# Altium schematic symbol library Capacitors.SchLib: 267 symbols (part 4 of 4)
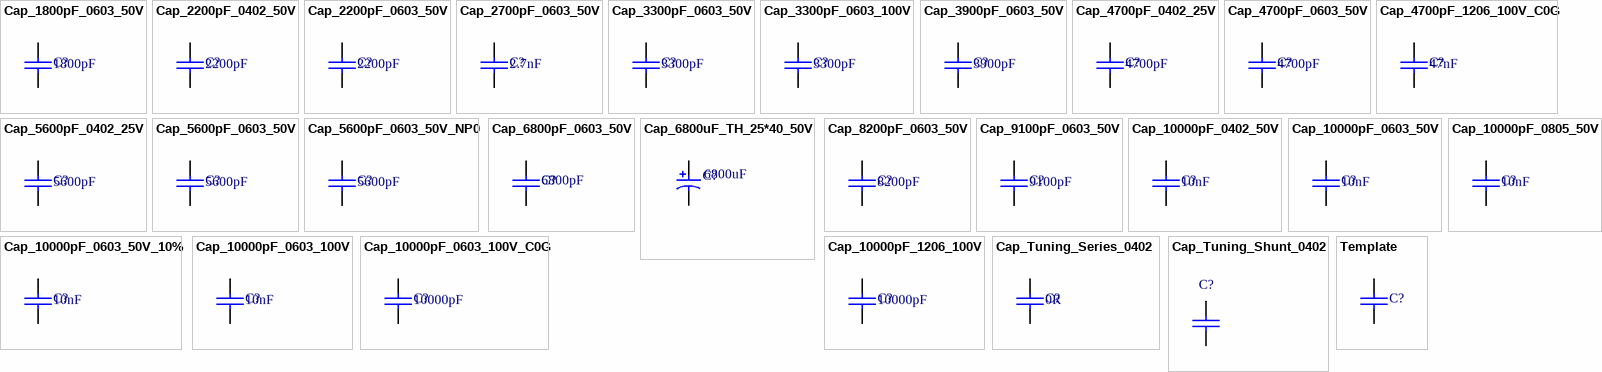
[diagram p9: symbols Cap_1800pF_0603_50V to Template]

## Cap_10000pF_1206_100V
designator C?, comment value 10000pF  (hidden comment: 10000pF 100V)
CAP CER 10000PF 100V X7R 1206; Manufacturer: Würth Elektronik; Manufacturer Part Number: 885012208112; Supplier 1: Digi-Key; Supplier Part Number 1: 732-12140-1-ND; Last modified by: J.Jaramillo; Last modified date: 20240309; ComponentLink1Description: Digi-Key; ComponentLink1URL: https://www.digikey.com/en/products/detail/w%C3%BCrth-elektronik/885012208112/9345952
footprint 1206 (3216 Metric / 20190221 / C-A.Serna.A)
pins: 1, 2

## Cap_Tuning_Series_0402
designator C?, comment value 0R  (hidden comment: 0R 1/16W)
RES SMD 0 OHM JUMPER 1/16W 0402; Manufacturer: Samsung Electro-Mechanics; Manufacturer Part Number: RC1005J000CS; ComponentLink1URL: https://www.digikey.com/products/en?keywords=1276-3480-1-ND; Supplier 1: Poshton; Supplier Part Number 1: RC0402FR-070RL; Reel stock: N/A; Last modified by: J.Jaramillo; Last modified date: 20240309; ComponentLink1Description: Digi-key
footprint 0402_RF
pins: 1, 2

## Cap_Tuning_Shunt_0402
designator C?  (no BOM)
Capacitor symbol for tuning network of Tx lines; Manufacturer: NA; Reel stock: RF tuning bag; Manufacturer Part Number: NA; Supplier 1: NA; Supplier Part Number 1: NA; Last modified by: J.Jaramillo; Last modified date: 20240309
footprint 0402_RF
pins: 1, 2

## Template
designator C?
Supplier 1: Digi-Key; Last modified date: 20240309
pins: 1, 2